# EAGLE library part DISP_TFT20_HT020SQV003NS_QT020HLCG00 (library dp_devices.v6)
2 in 1 2.0" TFT display, HT020SQV003NS and QT020HLCG00
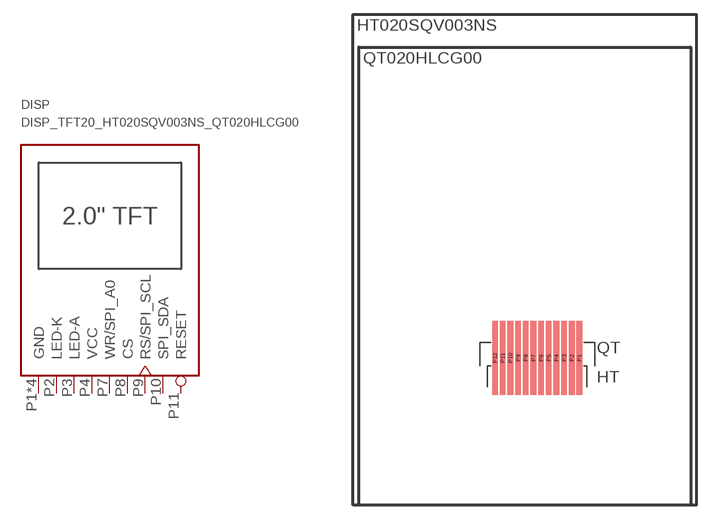
[diagram p210: symbol with the pads of HT020SQV003NS_QT020HLCG00; footprint HT020SQV003NS_QT020HLCG00]

Designator prefix DISP

## DISP_TFT20_HT020SQV003NS_QT020HLCG00  [HT020SQV003NS_QT020HLCG00]
P1  GND  pwr
P2  LED-K  pwr
P3  LED-A  pwr
P4  VCC  pwr
P5  GND  pwr
P6  GND  pwr
P7  WR/SPI_A0  in
P8  CS  in
P9  RS/SPI_SCL  in
P10  SPI_SDA
P11  RESET  in
P12  GND  pwr

## Footprint HT020SQV003NS_QT020HLCG00 (pad centres in mm)
smd 0.6 x 7.7: P1 5.7,-10.25; P2 4.9,-10.25; P3 4.1,-10.25; P4 3.3,-10.25; P5 2.5,-10.25; P6 1.7,-10.25; P7 0.9,-10.25; P8 0.1,-10.25; P9 -0.7,-10.25; P10 -1.5,-10.25; P11 -2.3,-10.25; P12 -3.1,-10.25